# Altium footprint library WR-PHD_Socket Header.PcbLib: 279 footprints (part 11 of 18)
Each footprint in its own frame and in the unit in brackets; x right, y up, seen from the top. Pads: shape width x height; smd on the part's side, far side on the other; paste and mask are expansions set on the pad; w line width, h text height; cw(c..) or ccw(c..) is an arc to the next point about the centre after c.
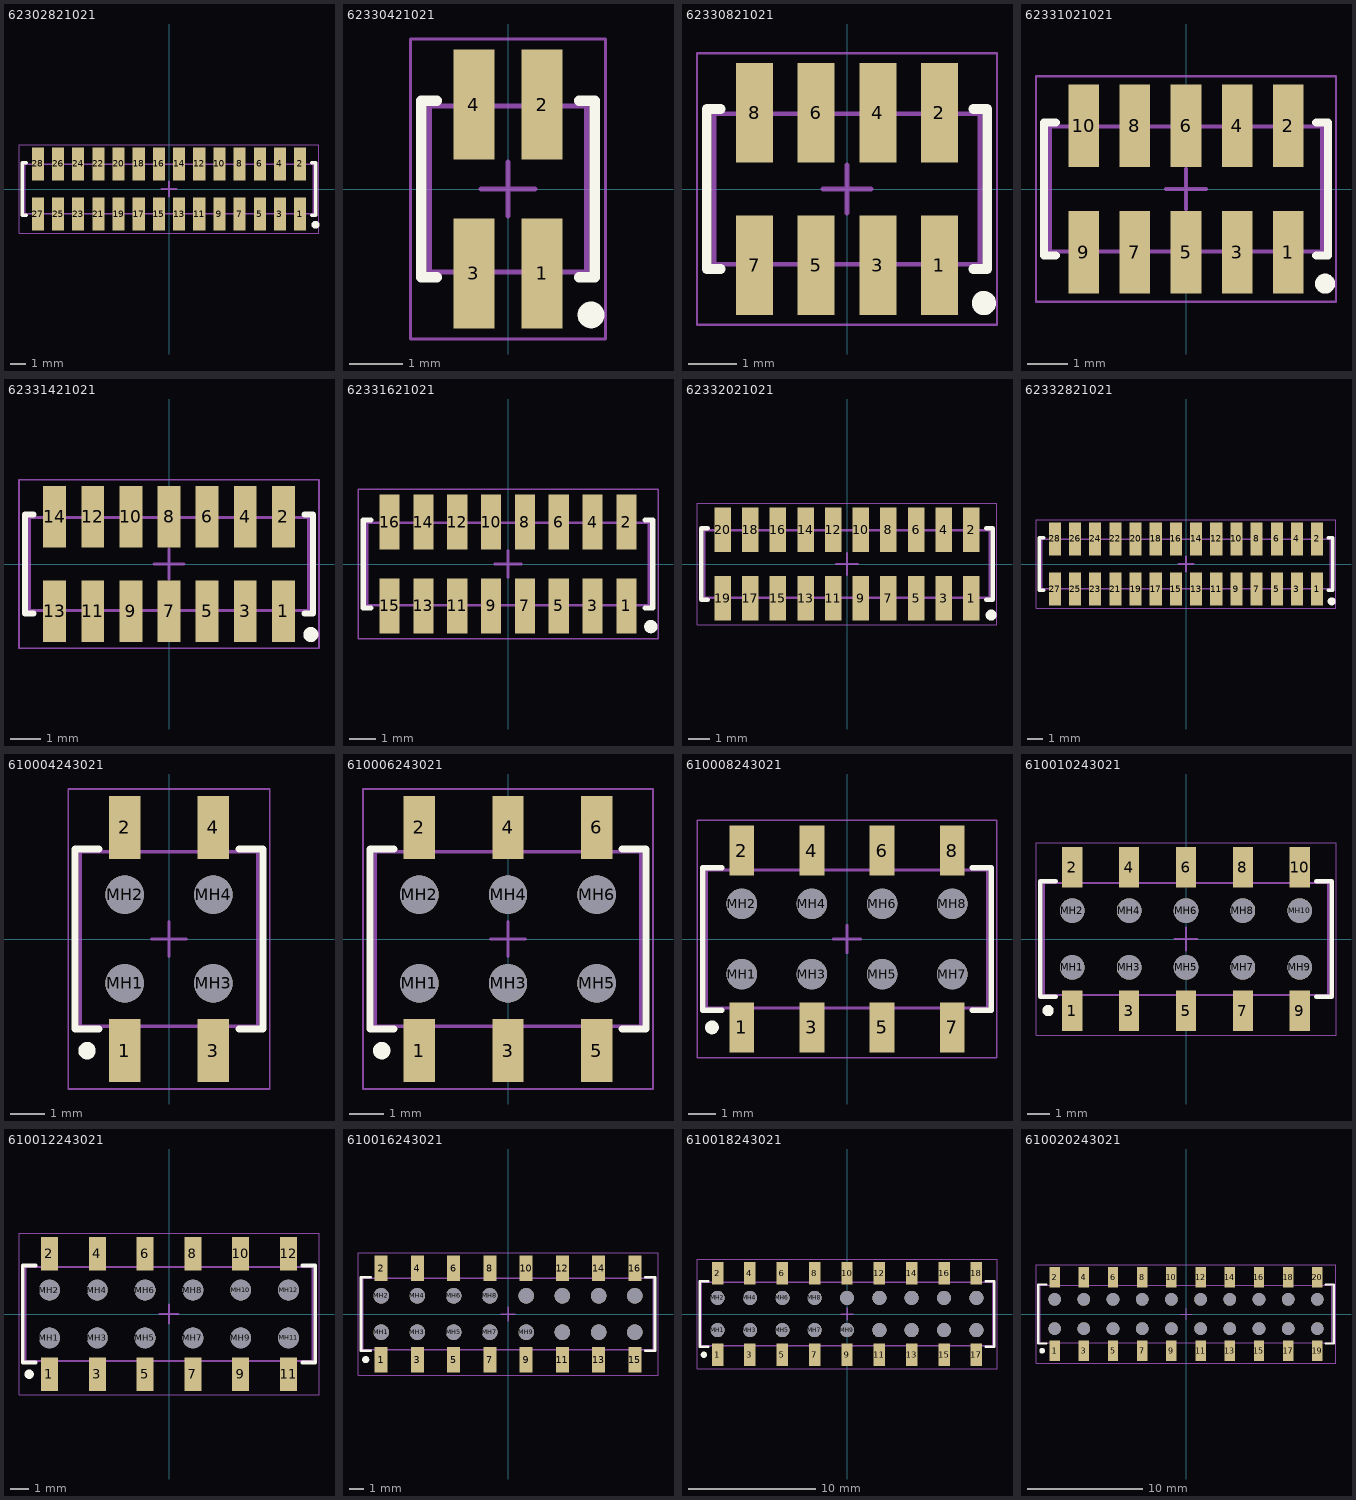
[diagram p10: the footprints below, top view; thin cyan lines are the x and y axes]

## 62302821021 [mm] "Socket Header, Pitch 1.27 mm, SMT, Vertical, dual row, 28p"
height 4.7
pads (28):
  rect 0.76x2.05 smd: 1(8.255,-1.575) 2(8.255,1.575) 3(6.985,-1.575) 4(6.985,1.575) 5(5.715,-1.575) 6(5.715,1.575) 7(4.445,-1.575) 8(4.445,1.575) 9(3.175,-1.575) 10(3.175,1.575) 11(1.905,-1.575) 12(1.905,1.575) 13(0.635,-1.575) 14(0.635,1.575) 15(-0.635,-1.575) 16(-0.635,1.575) 17(-1.905,-1.575) 18(-1.905,1.575) 19(-3.175,-1.575) 20(-3.175,1.575) 21(-4.445,-1.575) 22(-4.445,1.575) 23(-5.715,-1.575) 24(-5.715,1.575) 25(-6.985,-1.575) 26(-6.985,1.575) 27(-8.255,-1.575) 28(-8.255,1.575)
Top Overlay:
  circle w0.25: c9.22,-2.25 r0.125
  lines w0.2: -8.97,-1.65 -9.24,-1.65 -9.24,1.65 -8.97,1.65 ; 8.97,-1.65 9.24,-1.65 9.24,1.65 8.97,1.65
Top Component Outline:
  lines w0.1: -8.505,-1.55 -8.505,-2.3 -8.005,-2.3 -8.005,-1.55 ; -8.505,1.55 -8.505,2.3 -8.005,2.3 -8.005,1.55 ; -7.235,-1.55 -7.235,-2.3 -6.735,-2.3 -6.735,-1.55 ; -7.235,1.55 -7.235,2.3 -6.735,2.3 -6.735,1.55 ; -5.965,-1.55 -5.965,-2.3 -5.465,-2.3 -5.465,-1.55 ; -5.965,1.55 -5.965,2.3 -5.465,2.3 -5.465,1.55 ; -4.695,-1.55 -4.695,-2.3 -4.195,-2.3 -4.195,-1.55 ; -4.695,1.55 -4.695,2.3 -4.195,2.3 -4.195,1.55 ; -3.425,-1.55 -3.425,-2.3 -2.925,-2.3 -2.925,-1.55 ; -3.425,1.55 -3.425,2.3 -2.925,2.3 -2.925,1.55 ; -2.155,-1.55 -2.155,-2.3 -1.655,-2.3 -1.655,-1.55 ; -2.155,1.55 -2.155,2.3 -1.655,2.3 -1.655,1.55 ; -0.885,-1.55 -0.885,-2.3 -0.385,-2.3 -0.385,-1.55 ; -0.885,1.55 -0.885,2.3 -0.385,2.3 -0.385,1.55 ; 0.385,-1.55 0.385,-2.3 0.885,-2.3 0.885,-1.55 ; 0.385,1.55 0.385,2.3 0.885,2.3 0.885,1.55 ; 1.655,-1.55 1.655,-2.3 2.155,-2.3 2.155,-1.55 ; 1.655,1.55 1.655,2.3 2.155,2.3 2.155,1.55 ; 2.925,-1.55 2.925,-2.3 3.425,-2.3 3.425,-1.55 ; 2.925,1.55 2.925,2.3 3.425,2.3 3.425,1.55 ; 4.195,-1.55 4.195,-2.3 4.695,-2.3 4.695,-1.55 ; 4.195,1.55 4.195,2.3 4.695,2.3 4.695,1.55 ; 5.465,-1.55 5.465,-2.3 5.965,-2.3 5.965,-1.55 ; 5.465,1.55 5.465,2.3 5.965,2.3 5.965,1.55 ; 6.735,-1.55 6.735,-2.3 7.235,-2.3 7.235,-1.55 ; 6.735,1.55 6.735,2.3 7.235,2.3 7.235,1.55 ; 8.005,-1.55 8.005,-2.3 8.505,-2.3 8.505,-1.55 ; 8.005,1.55 8.005,2.3 8.505,2.3 8.505,1.55 ; -9.09,-1.55 -9.09,1.55 9.09,1.55 9.09,-1.55 -9.09,-1.55
Top Designator:
  text ".Designator" at -3.647,-0.357 h1
Top Courtyard:
  lines w0.05: -9.44,-2.8 9.44,-2.8 9.44,2.8 -9.44,2.8 -9.44,-2.8
Top Component Center:
  lines w0.1: -0.5,0 0.5,0 ; 0,-0.5 0,0.5
3D body "62302821021.stp": height 4.6, standoff 0, extent -9.09,-2.299 9.09,2.299

## 62330421021 [mm] "Socket Header, Pitch 1.27 mm, SMT, Vertical, dual row, 4p"
height 4.7
pads (4):
  rect 0.76x2.05 smd: 1(0.635,-1.575) 2(0.635,1.575) 3(-0.635,-1.575) 4(-0.635,1.575)
Top Overlay:
  circle w0.25: c1.55,-2.35 r0.125
  lines w0.2: -1.33,-1.65 -1.62,-1.65 -1.62,1.65 -1.33,1.65 ; 1.33,-1.65 1.62,-1.65 1.62,1.65 1.33,1.65
Top Component Outline:
  lines w0.1: -0.885,-1.55 -0.885,-2.3 -0.385,-2.3 -0.385,-1.55 ; -0.885,1.55 -0.885,2.3 -0.385,2.3 -0.385,1.55 ; 0.385,-1.55 0.385,-2.3 0.885,-2.3 0.885,-1.55 ; 0.385,1.55 0.385,2.3 0.885,2.3 0.885,1.55 ; -1.47,-1.55 1.47,-1.55 1.47,1.55 -1.47,1.55 -1.47,-1.55
Top Designator:
  text ".Designator" at -3.647,-0.357 h1
Top Courtyard:
  lines w0.05: -1.82,-2.8 -1.82,2.8 1.82,2.8 1.82,-2.8 -1.82,-2.8
Top Component Center:
  lines w0.1: -0.5,0 0.5,0 ; 0,-0.5 0,0.5
3D body "62330421021.stp": height 4.69, standoff -0.01, extent -1.5,-2.299 1.5,2.299

## 62330821021 [mm] "Socket Header, Pitch 1.27 mm, SMT, Vertical, dual row, 8p"
height 4.7
pads (8):
  rect 0.76x2.05 smd: 1(1.905,-1.575) 2(1.905,1.575) 3(0.635,-1.575) 4(0.635,1.575) 5(-0.635,-1.575) 6(-0.635,1.575) 7(-1.905,-1.575) 8(-1.905,1.575)
Top Overlay:
  circle w0.25: c2.82,-2.35 r0.125
  lines w0.2: -2.6,-1.65 -2.89,-1.65 -2.89,1.65 -2.6,1.65 ; 2.6,-1.65 2.89,-1.65 2.89,1.65 2.6,1.65
Top Component Outline:
  lines w0.1: -2.155,-1.55 -2.155,-2.3 -1.655,-2.3 -1.655,-1.55 ; -2.155,1.55 -2.155,2.3 -1.655,2.3 -1.655,1.55 ; -0.885,-1.55 -0.885,-2.3 -0.385,-2.3 -0.385,-1.55 ; -0.885,1.55 -0.885,2.3 -0.385,2.3 -0.385,1.55 ; 0.385,-1.55 0.385,-2.3 0.885,-2.3 0.885,-1.55 ; 0.385,1.55 0.385,2.3 0.885,2.3 0.885,1.55 ; 1.655,-1.55 1.655,-2.3 2.155,-2.3 2.155,-1.55 ; 1.655,1.55 1.655,2.3 2.155,2.3 2.155,1.55 ; -2.74,-1.55 2.74,-1.55 2.74,1.55 -2.74,1.55 -2.74,-1.55
Top Designator:
  text ".Designator" at -3.647,-0.357 h1
Top Courtyard:
  lines w0.05: -3.09,-2.8 -3.09,2.8 3.09,2.8 3.09,-2.8 -3.09,-2.8
Top Component Center:
  lines w0.1: -0.5,0 0.5,0 ; 0,-0.5 0,0.5
3D body "62330821021.stp": height 4.69, standoff -0.01, extent -2.74,-2.299 2.74,2.299

## 62331021021 [mm] "Socket Header, Pitch 1.27 mm, SMT, Vertical, dual row, 10p"
height 4.7
pads (10):
  rect 0.76x2.05 smd: 1(2.54,-1.575) 2(2.54,1.575) 3(1.27,-1.575) 4(1.27,1.575) 5(0,-1.575) 6(0,1.575) 7(-1.27,-1.575) 8(-1.27,1.575) 9(-2.54,-1.575) 10(-2.54,1.575)
Top Overlay:
  circle w0.25: c3.455,-2.35 r0.125
  lines w0.2: -3.235,-1.65 -3.525,-1.65 -3.525,1.65 -3.235,1.65 ; 3.235,-1.65 3.525,-1.65 3.525,1.65 3.235,1.65
Top Component Outline:
  lines w0.1: -2.79,-1.55 -2.79,-2.3 -2.29,-2.3 -2.29,-1.55 ; -2.79,1.55 -2.79,2.3 -2.29,2.3 -2.29,1.55 ; -1.52,-1.55 -1.52,-2.3 -1.02,-2.3 -1.02,-1.55 ; -1.52,1.55 -1.52,2.3 -1.02,2.3 -1.02,1.55 ; -0.25,-1.55 -0.25,-2.3 0.25,-2.3 0.25,-1.55 ; -0.25,1.55 -0.25,2.3 0.25,2.3 0.25,1.55 ; 1.02,-1.55 1.02,-2.3 1.52,-2.3 1.52,-1.55 ; 1.02,1.55 1.02,2.3 1.52,2.3 1.52,1.55 ; 2.29,-1.55 2.29,-2.3 2.79,-2.3 2.79,-1.55 ; 2.29,1.55 2.29,2.3 2.79,2.3 2.79,1.55 ; -3.375,-1.55 3.375,-1.55 3.375,1.55 -3.375,1.55 -3.375,-1.55
Top Designator:
  text ".Designator" at -3.647,-0.357 h1
Top Courtyard:
  lines w0.05: -3.725,-2.8 -3.725,2.8 3.725,2.8 3.725,-2.8 -3.725,-2.8
Top Component Center:
  lines w0.1: -0.5,0 0.5,0 ; 0,-0.5 0,0.5
3D body "62331021021.stp": height 4.69, standoff -0.01, extent -3.375,-2.299 3.375,2.299

## 62331421021 [mm] "Socket Header, Pitch 1.27 mm, SMT, Vertical, dual row, 14p"
height 4.7
pads (14):
  rect 0.76x2.05 smd: 1(3.81,-1.575) 2(3.81,1.575) 3(2.54,-1.575) 4(2.54,1.575) 5(1.27,-1.575) 6(1.27,1.575) 7(0,-1.575) 8(0,1.575) 9(-1.27,-1.575) 10(-1.27,1.575) 11(-2.54,-1.575) 12(-2.54,1.575) 13(-3.81,-1.575) 14(-3.81,1.575)
Top Overlay:
  circle w0.25: c4.725,-2.35 r0.125
  lines w0.2: -4.505,-1.65 -4.795,-1.65 -4.795,1.65 -4.505,1.65 ; 4.505,-1.65 4.795,-1.65 4.795,1.65 4.505,1.65
Top Component Outline:
  lines w0.1: -4.06,-1.55 -4.06,-2.3 -3.56,-2.3 -3.56,-1.55 ; -4.06,1.55 -4.06,2.3 -3.56,2.3 -3.56,1.55 ; -2.79,-1.55 -2.79,-2.3 -2.29,-2.3 -2.29,-1.55 ; -2.79,1.55 -2.79,2.3 -2.29,2.3 -2.29,1.55 ; -1.52,-1.55 -1.52,-2.3 -1.02,-2.3 -1.02,-1.55 ; -1.52,1.55 -1.52,2.3 -1.02,2.3 -1.02,1.55 ; -0.25,-1.55 -0.25,-2.3 0.25,-2.3 0.25,-1.55 ; -0.25,1.55 -0.25,2.3 0.25,2.3 0.25,1.55 ; 1.02,-1.55 1.02,-2.3 1.52,-2.3 1.52,-1.55 ; 1.02,1.55 1.02,2.3 1.52,2.3 1.52,1.55 ; 2.29,-1.55 2.29,-2.3 2.79,-2.3 2.79,-1.55 ; 2.29,1.55 2.29,2.3 2.79,2.3 2.79,1.55 ; 3.56,-1.55 3.56,-2.3 4.06,-2.3 4.06,-1.55 ; 3.56,1.55 3.56,2.3 4.06,2.3 4.06,1.55 ; -4.645,-1.55 4.645,-1.55 4.645,1.55 -4.645,1.55 -4.645,-1.55
Top Designator:
  text ".Designator" at -3.647,-0.357 h1
Top Courtyard:
  lines w0.05: -4.995,-2.8 -4.995,2.8 4.995,2.8 4.995,-2.8 -4.995,-2.8
Top Component Center:
  lines w0.1: -0.5,0 0.5,0 ; 0,-0.5 0,0.5
3D body "62331421021.stp": height 4.69, standoff -0.01, extent -4.645,-2.299 4.645,2.299

## 62331621021 [mm] "Socket Header, Pitch 1.27 mm, SMT, Vertical, dual row, 16p"
height 4.7
pads (16):
  rect 0.76x2.05 smd: 1(4.445,-1.575) 2(4.445,1.575) 3(3.175,-1.575) 4(3.175,1.575) 5(1.905,-1.575) 6(1.905,1.575) 7(0.635,-1.575) 8(0.635,1.575) 9(-0.635,-1.575) 10(-0.635,1.575) 11(-1.905,-1.575) 12(-1.905,1.575) 13(-3.175,-1.575) 14(-3.175,1.575) 15(-4.445,-1.575) 16(-4.445,1.575)
Top Overlay:
  circle w0.25: c5.36,-2.35 r0.125
  lines w0.2: -5.14,-1.65 -5.43,-1.65 -5.43,1.65 -5.14,1.65 ; 5.14,-1.65 5.43,-1.65 5.43,1.65 5.14,1.65
Top Component Outline:
  lines w0.1: -4.695,-1.55 -4.695,-2.3 -4.195,-2.3 -4.195,-1.55 ; -4.695,1.55 -4.695,2.3 -4.195,2.3 -4.195,1.55 ; -3.425,-1.55 -3.425,-2.3 -2.925,-2.3 -2.925,-1.55 ; -3.425,1.55 -3.425,2.3 -2.925,2.3 -2.925,1.55 ; -2.155,-1.55 -2.155,-2.3 -1.655,-2.3 -1.655,-1.55 ; -2.155,1.55 -2.155,2.3 -1.655,2.3 -1.655,1.55 ; -0.885,-1.55 -0.885,-2.3 -0.385,-2.3 -0.385,-1.55 ; -0.885,1.55 -0.885,2.3 -0.385,2.3 -0.385,1.55 ; 0.385,-1.55 0.385,-2.3 0.885,-2.3 0.885,-1.55 ; 0.385,1.55 0.385,2.3 0.885,2.3 0.885,1.55 ; 1.655,-1.55 1.655,-2.3 2.155,-2.3 2.155,-1.55 ; 1.655,1.55 1.655,2.3 2.155,2.3 2.155,1.55 ; 2.925,-1.55 2.925,-2.3 3.425,-2.3 3.425,-1.55 ; 2.925,1.55 2.925,2.3 3.425,2.3 3.425,1.55 ; 4.195,-1.55 4.195,-2.3 4.695,-2.3 4.695,-1.55 ; 4.195,1.55 4.195,2.3 4.695,2.3 4.695,1.55 ; -5.28,-1.55 5.28,-1.55 5.28,1.55 -5.28,1.55 -5.28,-1.55
Top Designator:
  text ".Designator" at -3.647,-0.357 h1
Top Courtyard:
  lines w0.05: -5.63,-2.8 -5.63,2.8 5.63,2.8 5.63,-2.8 -5.63,-2.8
Top Component Center:
  lines w0.1: -0.5,0 0.5,0 ; 0,-0.5 0,0.5
3D body "62331621021.stp": height 4.69, standoff -0.01, extent -5.28,-2.299 5.28,2.299

## 62332021021 [mm] "Socket Header, Pitch 1.27 mm, SMT, Vertical, dual row, 20p"
height 4.7
pads (20):
  rect 0.76x2.05 smd: 1(5.715,-1.575) 2(5.715,1.575) 3(4.445,-1.575) 4(4.445,1.575) 5(3.175,-1.575) 6(3.175,1.575) 7(1.905,-1.575) 8(1.905,1.575) 9(0.635,-1.575) 10(0.635,1.575) 11(-0.635,-1.575) 12(-0.635,1.575) 13(-1.905,-1.575) 14(-1.905,1.575) 15(-3.175,-1.575) 16(-3.175,1.575) 17(-4.445,-1.575) 18(-4.445,1.575) 19(-5.715,-1.575) 20(-5.715,1.575)
Top Overlay:
  circle w0.25: c6.63,-2.35 r0.125
  lines w0.2: -6.41,-1.65 -6.7,-1.65 -6.7,1.65 -6.41,1.65 ; 6.41,-1.65 6.7,-1.65 6.7,1.65 6.41,1.65
Top Component Outline:
  lines w0.1: -5.965,-1.55 -5.965,-2.3 -5.465,-2.3 -5.465,-1.55 ; -5.965,1.55 -5.965,2.3 -5.465,2.3 -5.465,1.55 ; -4.695,-1.55 -4.695,-2.3 -4.195,-2.3 -4.195,-1.55 ; -4.695,1.55 -4.695,2.3 -4.195,2.3 -4.195,1.55 ; -3.425,-1.55 -3.425,-2.3 -2.925,-2.3 -2.925,-1.55 ; -3.425,1.55 -3.425,2.3 -2.925,2.3 -2.925,1.55 ; -2.155,-1.55 -2.155,-2.3 -1.655,-2.3 -1.655,-1.55 ; -2.155,1.55 -2.155,2.3 -1.655,2.3 -1.655,1.55 ; -0.885,-1.55 -0.885,-2.3 -0.385,-2.3 -0.385,-1.55 ; -0.885,1.55 -0.885,2.3 -0.385,2.3 -0.385,1.55 ; 0.385,-1.55 0.385,-2.3 0.885,-2.3 0.885,-1.55 ; 0.385,1.55 0.385,2.3 0.885,2.3 0.885,1.55 ; 1.655,-1.55 1.655,-2.3 2.155,-2.3 2.155,-1.55 ; 1.655,1.55 1.655,2.3 2.155,2.3 2.155,1.55 ; 2.925,-1.55 2.925,-2.3 3.425,-2.3 3.425,-1.55 ; 2.925,1.55 2.925,2.3 3.425,2.3 3.425,1.55 ; 4.195,-1.55 4.195,-2.3 4.695,-2.3 4.695,-1.55 ; 4.195,1.55 4.195,2.3 4.695,2.3 4.695,1.55 ; 5.465,-1.55 5.465,-2.3 5.965,-2.3 5.965,-1.55 ; 5.465,1.55 5.465,2.3 5.965,2.3 5.965,1.55 ; -6.55,-1.55 6.55,-1.55 6.55,1.55 -6.55,1.55 -6.55,-1.55
Top Designator:
  text ".Designator" at -3.647,-0.357 h1
Top Courtyard:
  lines w0.05: -6.9,-2.8 -6.9,2.8 6.9,2.8 6.9,-2.8 -6.9,-2.8
Top Component Center:
  lines w0.1: -0.5,0 0.5,0 ; 0,-0.5 0,0.5
3D body "62332021021.stp": height 4.69, standoff -0.01, extent -6.55,-2.299 6.55,2.299

## 62332821021 [mm] "Socket Header, Pitch 1.27 mm, SMT, Vertical, dual row, 28p"
height 4.7
pads (28):
  rect 0.76x2.05 smd: 1(8.255,-1.575) 2(8.255,1.575) 3(6.985,-1.575) 4(6.985,1.575) 5(5.715,-1.575) 6(5.715,1.575) 7(4.445,-1.575) 8(4.445,1.575) 9(3.175,-1.575) 10(3.175,1.575) 11(1.905,-1.575) 12(1.905,1.575) 13(0.635,-1.575) 14(0.635,1.575) 15(-0.635,-1.575) 16(-0.635,1.575) 17(-1.905,-1.575) 18(-1.905,1.575) 19(-3.175,-1.575) 20(-3.175,1.575) 21(-4.445,-1.575) 22(-4.445,1.575) 23(-5.715,-1.575) 24(-5.715,1.575) 25(-6.985,-1.575) 26(-6.985,1.575) 27(-8.255,-1.575) 28(-8.255,1.575)
Top Overlay:
  circle w0.25: c9.17,-2.35 r0.125
  lines w0.2: -8.95,-1.65 -9.24,-1.65 -9.24,1.65 -8.95,1.65 ; 8.95,-1.65 9.24,-1.65 9.24,1.65 8.95,1.65
Top Component Outline:
  lines w0.1: -8.505,-1.55 -8.505,-2.3 -8.005,-2.3 -8.005,-1.55 ; -8.505,1.55 -8.505,2.3 -8.005,2.3 -8.005,1.55 ; -7.235,-1.55 -7.235,-2.3 -6.735,-2.3 -6.735,-1.55 ; -7.235,1.55 -7.235,2.3 -6.735,2.3 -6.735,1.55 ; -5.965,-1.55 -5.965,-2.3 -5.465,-2.3 -5.465,-1.55 ; -5.965,1.55 -5.965,2.3 -5.465,2.3 -5.465,1.55 ; -4.695,-1.55 -4.695,-2.3 -4.195,-2.3 -4.195,-1.55 ; -4.695,1.55 -4.695,2.3 -4.195,2.3 -4.195,1.55 ; -3.425,-1.55 -3.425,-2.3 -2.925,-2.3 -2.925,-1.55 ; -3.425,1.55 -3.425,2.3 -2.925,2.3 -2.925,1.55 ; -2.155,-1.55 -2.155,-2.3 -1.655,-2.3 -1.655,-1.55 ; -2.155,1.55 -2.155,2.3 -1.655,2.3 -1.655,1.55 ; -0.885,-1.55 -0.885,-2.3 -0.385,-2.3 -0.385,-1.55 ; -0.885,1.55 -0.885,2.3 -0.385,2.3 -0.385,1.55 ; 0.385,-1.55 0.385,-2.3 0.885,-2.3 0.885,-1.55 ; 0.385,1.55 0.385,2.3 0.885,2.3 0.885,1.55 ; 1.655,-1.55 1.655,-2.3 2.155,-2.3 2.155,-1.55 ; 1.655,1.55 1.655,2.3 2.155,2.3 2.155,1.55 ; 2.925,-1.55 2.925,-2.3 3.425,-2.3 3.425,-1.55 ; 2.925,1.55 2.925,2.3 3.425,2.3 3.425,1.55 ; 4.195,-1.55 4.195,-2.3 4.695,-2.3 4.695,-1.55 ; 4.195,1.55 4.195,2.3 4.695,2.3 4.695,1.55 ; 5.465,-1.55 5.465,-2.3 5.965,-2.3 5.965,-1.55 ; 5.465,1.55 5.465,2.3 5.965,2.3 5.965,1.55 ; 6.735,-1.55 6.735,-2.3 7.235,-2.3 7.235,-1.55 ; 6.735,1.55 6.735,2.3 7.235,2.3 7.235,1.55 ; 8.005,-1.55 8.005,-2.3 8.505,-2.3 8.505,-1.55 ; 8.005,1.55 8.005,2.3 8.505,2.3 8.505,1.55 ; -9.09,-1.55 9.09,-1.55 9.09,1.55 -9.09,1.55 -9.09,-1.55
Top Designator:
  text ".Designator" at -3.647,-0.357 h1
Top Courtyard:
  lines w0.05: -9.44,-2.8 -9.44,2.8 9.44,2.8 9.44,-2.8 -9.44,-2.8
Top Component Center:
  lines w0.1: -0.5,0 0.5,0 ; 0,-0.5 0,0.5
3D body "62332821021.stp": height 4.69, standoff -0.01, extent -9.09,-2.299 9.09,2.299

## 610004243021 [mm] "Socket Header, Pitch 2.54 mm, SMT, Vertical, dual row, 4p"
height 3.7
pads (8):
  rect 0.9x1.8 smd: 1(-1.27,-3.2) 2(-1.27,3.2) 3(1.27,-3.2) 4(1.27,3.2)
  round 1.1 hole 1.1 unplated: MH1(-1.27,-1.27) MH2(-1.27,1.27) MH3(1.27,-1.27) MH4(1.27,1.27)
Top Overlay:
  circle w0.25: c-2.35,-3.2 r0.125
  lines w0.2: -2,-2.575 -2.69,-2.575 -2.69,2.575 -2,2.575 ; 2,-2.575 2.69,-2.575 2.69,2.575 2,2.575
Top Component Outline:
  lines w0.1: -1.52,-2.5 -1.52,-3.6 -1.02,-3.6 -1.02,-2.5 ; -1.52,2.5 -1.52,3.6 -1.02,3.6 -1.02,2.5 ; 1.02,-2.5 1.02,-3.6 1.52,-3.6 1.52,-2.5 ; 1.02,2.5 1.02,3.6 1.52,3.6 1.52,2.5 ; -2.54,-2.5 2.54,-2.5 2.54,2.5 -2.54,2.5 -2.54,-2.5
Top Designator:
  text ".Designator" at -3.647,-0.357 h1
Top Courtyard:
  lines w0.05: -2.89,-4.3 -2.89,4.3 2.89,4.3 2.89,-4.3 -2.89,-4.3
Top Component Center:
  lines w0.1: -0.5,0 0.5,0 ; 0,-0.5 0,0.5
3D body "610004243021.stp": height 3.7, standoff 0, extent -2.54,-3.603 2.54,3.603

## 610006243021 [mm] "Socket Header, Pitch 2.54 mm, SMT, Vertical, dual row, 6p"
height 3.7
pads (12):
  rect 0.9x1.8 smd: 1(-2.54,-3.2) 2(-2.54,3.2) 3(0,-3.2) 4(0,3.2) 5(2.54,-3.2) 6(2.54,3.2)
  round 1.1 hole 1.1 unplated: MH1(-2.54,-1.27) MH2(-2.54,1.27) MH3(0,-1.27) MH4(0,1.27) MH5(2.54,-1.27) MH6(2.54,1.27)
Top Overlay:
  circle w0.25: c-3.62,-3.2 r0.125
  lines w0.2: -3.27,-2.575 -3.96,-2.575 -3.96,2.575 -3.27,2.575 ; 3.27,-2.575 3.96,-2.575 3.96,2.575 3.27,2.575
Top Component Outline:
  lines w0.1: -2.79,-2.5 -2.79,-3.6 -2.29,-3.6 -2.29,-2.5 ; -2.79,2.5 -2.79,3.6 -2.29,3.6 -2.29,2.5 ; -0.25,-2.5 -0.25,-3.6 0.25,-3.6 0.25,-2.5 ; -0.25,2.5 -0.25,3.6 0.25,3.6 0.25,2.5 ; 2.29,-2.5 2.29,-3.6 2.79,-3.6 2.79,-2.5 ; 2.29,2.5 2.29,3.6 2.79,3.6 2.79,2.5 ; -3.81,-2.5 3.81,-2.5 3.81,2.5 -3.81,2.5 -3.81,-2.5
Top Designator:
  text ".Designator" at -3.647,-0.357 h1
Top Courtyard:
  lines w0.05: -4.16,-4.3 -4.16,4.3 4.16,4.3 4.16,-4.3 -4.16,-4.3
Top Component Center:
  lines w0.1: -0.5,0 0.5,0 ; 0,-0.5 0,0.5
3D body "610006243021.stp": height 3.7, standoff 0, extent -3.81,-3.603 3.81,3.603

## 610008243021 [mm] "Socket Header, Pitch 2.54 mm, SMT, Vertical, dual row, 8p"
height 3.7
pads (16):
  rect 0.9x1.8 smd: 1(-3.81,-3.2) 2(-3.81,3.2) 3(-1.27,-3.2) 4(-1.27,3.2) 5(1.27,-3.2) 6(1.27,3.2) 7(3.81,-3.2) 8(3.81,3.2)
  round 1.1 hole 1.1 unplated: MH1(-3.81,-1.27) MH2(-3.81,1.27) MH3(-1.27,-1.27) MH4(-1.27,1.27) MH5(1.27,-1.27) MH6(1.27,1.27) MH7(3.81,-1.27) MH8(3.81,1.27)
Top Overlay:
  circle w0.25: c-4.89,-3.2 r0.125
  lines w0.2: -4.54,-2.575 -5.23,-2.575 -5.23,2.575 -4.54,2.575 ; 4.54,-2.575 5.23,-2.575 5.23,2.575 4.54,2.575
Top Component Outline:
  lines w0.1: -4.06,-2.5 -4.06,-3.6 -3.56,-3.6 -3.56,-2.5 ; -4.06,2.5 -4.06,3.6 -3.56,3.6 -3.56,2.5 ; -1.52,-2.5 -1.52,-3.6 -1.02,-3.6 -1.02,-2.5 ; -1.52,2.5 -1.52,3.6 -1.02,3.6 -1.02,2.5 ; 1.02,-2.5 1.02,-3.6 1.52,-3.6 1.52,-2.5 ; 1.02,2.5 1.02,3.6 1.52,3.6 1.52,2.5 ; 3.56,-2.5 3.56,-3.6 4.06,-3.6 4.06,-2.5 ; 3.56,2.5 3.56,3.6 4.06,3.6 4.06,2.5 ; -5.08,-2.5 -5.08,2.5 5.08,2.5 5.08,-2.5 -5.08,-2.5
Top Designator:
  text ".Designator" at -3.647,-0.357 h1
Top Courtyard:
  lines w0.05: -5.43,-4.3 5.43,-4.3 5.43,4.3 -5.43,4.3 -5.43,-4.3
Top Component Center:
  lines w0.1: -0.5,0 0.5,0 ; 0,-0.5 0,0.5
3D body "610008243021.stp": height 3.7, standoff 0, extent -5.08,-3.603 5.08,3.603

## 610010243021 [mm] "Socket Header, Pitch 2.54 mm, SMT, Vertical, dual row, 10p"
height 3.7
pads (20):
  rect 0.9x1.8 smd: 1(-5.08,-3.2) 2(-5.08,3.2) 3(-2.54,-3.2) 4(-2.54,3.2) 5(0,-3.2) 6(0,3.2) 7(2.54,-3.2) 8(2.54,3.2) 9(5.08,-3.2) 10(5.08,3.2)
  round 1.1 hole 1.1 unplated: MH1(-5.08,-1.27) MH2(-5.08,1.27) MH3(-2.54,-1.27) MH4(-2.54,1.27) MH5(0,-1.27) MH6(0,1.27) MH7(2.54,-1.27) MH8(2.54,1.27) MH9(5.08,-1.27) MH10(5.08,1.27)
Top Overlay:
  circle w0.25: c-6.16,-3.2 r0.125
  lines w0.2: -5.81,-2.575 -6.5,-2.575 -6.5,2.575 -5.81,2.575 ; 5.81,-2.575 6.5,-2.575 6.5,2.575 5.81,2.575
Top Component Outline:
  lines w0.1: -5.33,-2.5 -5.33,-3.6 -4.83,-3.6 -4.83,-2.5 ; -5.33,2.5 -5.33,3.6 -4.83,3.6 -4.83,2.5 ; -2.79,-2.5 -2.79,-3.6 -2.29,-3.6 -2.29,-2.5 ; -2.79,2.5 -2.79,3.6 -2.29,3.6 -2.29,2.5 ; -0.25,-2.5 -0.25,-3.6 0.25,-3.6 0.25,-2.5 ; -0.25,2.5 -0.25,3.6 0.25,3.6 0.25,2.5 ; 2.29,-2.5 2.29,-3.6 2.79,-3.6 2.79,-2.5 ; 2.29,2.5 2.29,3.6 2.79,3.6 2.79,2.5 ; 4.83,-2.5 4.83,-3.6 5.33,-3.6 5.33,-2.5 ; 4.83,2.5 4.83,3.6 5.33,3.6 5.33,2.5 ; -6.35,-2.5 6.35,-2.5 6.35,2.5 -6.35,2.5 -6.35,-2.5
Top Designator:
  text ".Designator" at -3.647,-0.357 h1
Top Courtyard:
  lines w0.05: -6.7,-4.3 6.7,-4.3 6.7,4.3 -6.7,4.3 -6.7,-4.3
Top Component Center:
  lines w0.1: -0.5,0 0.5,0 ; 0,-0.5 0,0.5
3D body "610010243021.stp": height 3.7, standoff 0, extent -6.35,-3.603 6.35,3.603

## 610012243021 [mm] "Socket Header, Pitch 2.54 mm, SMT, Vertical, dual row, 12p"
height 3.7
pads (24):
  rect 0.9x1.8 smd: 1(-6.35,-3.2) 2(-6.35,3.2) 3(-3.81,-3.2) 4(-3.81,3.2) 5(-1.27,-3.2) 6(-1.27,3.2) 7(1.27,-3.2) 8(1.27,3.2) 9(3.81,-3.2) 10(3.81,3.2) 11(6.35,-3.2) 12(6.35,3.2)
  round 1.1 hole 1.1 unplated: MH1(-6.35,-1.27) MH2(-6.35,1.27) MH3(-3.81,-1.27) MH4(-3.81,1.27) MH5(-1.27,-1.27) MH6(-1.27,1.27) MH7(1.27,-1.27) MH8(1.27,1.27) MH9(3.81,-1.27) MH10(3.81,1.27) MH11(6.35,-1.27) MH12(6.35,1.27)
Top Overlay:
  circle w0.25: c-7.43,-3.2 r0.125
  lines w0.2: -7.08,-2.575 -7.77,-2.575 -7.77,2.575 -7.08,2.575 ; 7.08,-2.575 7.77,-2.575 7.77,2.575 7.08,2.575
Top Component Outline:
  lines w0.1: -6.6,-2.5 -6.6,-3.6 -6.1,-3.6 -6.1,-2.5 ; -6.6,2.5 -6.6,3.6 -6.1,3.6 -6.1,2.5 ; -4.06,-2.5 -4.06,-3.6 -3.56,-3.6 -3.56,-2.5 ; -4.06,2.5 -4.06,3.6 -3.56,3.6 -3.56,2.5 ; -1.52,-2.5 -1.52,-3.6 -1.02,-3.6 -1.02,-2.5 ; -1.52,2.5 -1.52,3.6 -1.02,3.6 -1.02,2.5 ; 1.02,-2.5 1.02,-3.6 1.52,-3.6 1.52,-2.5 ; 1.02,2.5 1.02,3.6 1.52,3.6 1.52,2.5 ; 3.56,-2.5 3.56,-3.6 4.06,-3.6 4.06,-2.5 ; 3.56,2.5 3.56,3.6 4.06,3.6 4.06,2.5 ; 6.1,-2.5 6.1,-3.6 6.6,-3.6 6.6,-2.5 ; 6.1,2.5 6.1,3.6 6.6,3.6 6.6,2.5 ; -7.62,-2.5 -7.62,2.5 7.62,2.5 7.62,-2.5 -7.62,-2.5
Top Designator:
  text ".Designator" at -3.647,-0.357 h1
Top Courtyard:
  lines w0.05: -7.97,-4.3 -7.97,4.3 7.97,4.3 7.97,-4.3 -7.97,-4.3
Top Component Center:
  lines w0.1: -0.5,0 0.5,0 ; 0,-0.5 0,0.5
3D body "610012243021.stp": height 3.7, standoff 0, extent -7.62,-3.603 7.62,3.603

## 610016243021 [mm] "Socket Header, Pitch 2.54 mm, SMT, Vertical, dual row, 16p"
height 3.7
pads (32):
  rect 0.9x1.8 smd: 1(-8.89,-3.2) 2(-8.89,3.2) 3(-6.35,-3.2) 4(-6.35,3.2) 5(-3.81,-3.2) 6(-3.81,3.2) 7(-1.27,-3.2) 8(-1.27,3.2) 9(1.27,-3.2) 10(1.27,3.2) 11(3.81,-3.2) 12(3.81,3.2) 13(6.35,-3.2) 14(6.35,3.2) 15(8.89,-3.2) 16(8.89,3.2)
  round 1.1 hole 1.1 unplated: MH1(-8.89,-1.27) MH2(-8.89,1.27) MH3(-6.35,-1.27) MH4(-6.35,1.27) MH5(-3.81,-1.27) MH6(-3.81,1.27) MH7(-1.27,-1.27) MH8(-1.27,1.27) MH9(1.27,-1.27) MH10(1.27,1.27) MH11(3.81,-1.27) MH12(3.81,1.27) MH13(6.35,-1.27) MH14(6.35,1.27) MH15(8.89,-1.27) MH16(8.89,1.27)
Top Overlay:
  circle w0.25: c-9.97,-3.2 r0.125
  lines w0.2: -9.62,-2.575 -10.31,-2.575 -10.31,2.575 -9.62,2.575 ; 9.62,-2.575 10.31,-2.575 10.31,2.575 9.62,2.575
Top Component Outline:
  lines w0.1: -9.14,-2.5 -9.14,-3.6 -8.64,-3.6 -8.64,-2.5 ; -9.14,2.5 -9.14,3.6 -8.64,3.6 -8.64,2.5 ; -6.6,-2.5 -6.6,-3.6 -6.1,-3.6 -6.1,-2.5 ; -6.6,2.5 -6.6,3.6 -6.1,3.6 -6.1,2.5 ; -4.06,-2.5 -4.06,-3.6 -3.56,-3.6 -3.56,-2.5 ; -4.06,2.5 -4.06,3.6 -3.56,3.6 -3.56,2.5 ; -1.52,-2.5 -1.52,-3.6 -1.02,-3.6 -1.02,-2.5 ; -1.52,2.5 -1.52,3.6 -1.02,3.6 -1.02,2.5 ; 1.02,-2.5 1.02,-3.6 1.52,-3.6 1.52,-2.5 ; 1.02,2.5 1.02,3.6 1.52,3.6 1.52,2.5 ; 3.56,-2.5 3.56,-3.6 4.06,-3.6 4.06,-2.5 ; 3.56,2.5 3.56,3.6 4.06,3.6 4.06,2.5 ; 6.1,-2.5 6.1,-3.6 6.6,-3.6 6.6,-2.5 ; 6.1,2.5 6.1,3.6 6.6,3.6 6.6,2.5 ; 8.64,-2.5 8.64,-3.6 9.14,-3.6 9.14,-2.5 ; 8.64,2.5 8.64,3.6 9.14,3.6 9.14,2.5 ; -10.16,-2.5 -10.16,2.5 10.16,2.5 10.16,-2.5 -10.16,-2.5
Top Designator:
  text ".Designator" at -3.647,-0.357 h1
Top Courtyard:
  lines w0.05: -10.51,-4.3 -10.51,4.3 10.51,4.3 10.51,-4.3 -10.51,-4.3
Top Component Center:
  lines w0.1: -0.5,0 0.5,0 ; 0,-0.5 0,0.5
3D body "610016243021.stp": height 3.7, standoff 0, extent -10.16,-3.603 10.16,3.603

## 610018243021 [mm] "Socket Header, Pitch 2.54 mm, SMT, Vertical, dual row, 18p"
height 3.7
pads (36):
  rect 0.9x1.8 smd: 1(-10.16,-3.2) 2(-10.16,3.2) 3(-7.62,-3.2) 4(-7.62,3.2) 5(-5.08,-3.2) 6(-5.08,3.2) 7(-2.54,-3.2) 8(-2.54,3.2) 9(0,-3.2) 10(0,3.2) 11(2.54,-3.2) 12(2.54,3.2) 13(5.08,-3.2) 14(5.08,3.2) 15(7.62,-3.2) 16(7.62,3.2) 17(10.16,-3.2) 18(10.16,3.2)
  round 1.1 hole 1.1 unplated: MH1(-10.16,-1.27) MH2(-10.16,1.27) MH3(-7.62,-1.27) MH4(-7.62,1.27) MH5(-5.08,-1.27) MH6(-5.08,1.27) MH7(-2.54,-1.27) MH8(-2.54,1.27) MH9(0,-1.27) MH10(0,1.27) MH11(2.54,-1.27) MH12(2.54,1.27) MH13(5.08,-1.27) MH14(5.08,1.27) MH15(7.62,-1.27) MH16(7.62,1.27) MH17(10.16,-1.27) MH18(10.16,1.27)
Top Overlay:
  circle w0.25: c-11.24,-3.2 r0.125
  lines w0.2: -10.89,-2.575 -11.58,-2.575 -11.58,2.575 -10.89,2.575 ; 10.89,-2.575 11.58,-2.575 11.58,2.575 10.89,2.575
Top Component Outline:
  lines w0.1: -10.41,-2.5 -10.41,-3.6 -9.91,-3.6 -9.91,-2.5 ; -10.41,2.5 -10.41,3.6 -9.91,3.6 -9.91,2.5 ; -7.87,-2.5 -7.87,-3.6 -7.37,-3.6 -7.37,-2.5 ; -7.87,2.5 -7.87,3.6 -7.37,3.6 -7.37,2.5 ; -5.33,-2.5 -5.33,-3.6 -4.83,-3.6 -4.83,-2.5 ; -5.33,2.5 -5.33,3.6 -4.83,3.6 -4.83,2.5 ; -2.79,-2.5 -2.79,-3.6 -2.29,-3.6 -2.29,-2.5 ; -2.79,2.5 -2.79,3.6 -2.29,3.6 -2.29,2.5 ; -0.25,-2.5 -0.25,-3.6 0.25,-3.6 0.25,-2.5 ; -0.25,2.5 -0.25,3.6 0.25,3.6 0.25,2.5 ; 2.29,-2.5 2.29,-3.6 2.79,-3.6 2.79,-2.5 ; 2.29,2.5 2.29,3.6 2.79,3.6 2.79,2.5 ; 4.83,-2.5 4.83,-3.6 5.33,-3.6 5.33,-2.5 ; 4.83,2.5 4.83,3.6 5.33,3.6 5.33,2.5 ; 7.37,-2.5 7.37,-3.6 7.87,-3.6 7.87,-2.5 ; 7.37,2.5 7.37,3.6 7.87,3.6 7.87,2.5 ; 9.91,-2.5 9.91,-3.6 10.41,-3.6 10.41,-2.5 ; 9.91,2.5 9.91,3.6 10.41,3.6 10.41,2.5 ; -11.43,-2.5 -11.43,2.5 11.43,2.5 11.43,-2.5 -11.43,-2.5
Top Designator:
  text ".Designator" at -3.647,-0.357 h1
Top Courtyard:
  lines w0.05: -11.78,-4.3 11.78,-4.3 11.78,4.3 -11.78,4.3 -11.78,-4.3
Top Component Center:
  lines w0.1: -0.5,0 0.5,0 ; 0,-0.5 0,0.5
3D body "610018243021.stp": height 3.7, standoff 0, extent -11.43,-3.603 11.43,3.603

## 610020243021 [mm] "Socket Header, Pitch 2.54 mm, SMT, Vertical, dual row, 20p"
height 3.7
pads (40):
  rect 0.9x1.8 smd: 1(-11.43,-3.2) 2(-11.43,3.2) 3(-8.89,-3.2) 4(-8.89,3.2) 5(-6.35,-3.2) 6(-6.35,3.2) 7(-3.81,-3.2) 8(-3.81,3.2) 9(-1.27,-3.2) 10(-1.27,3.2) 11(1.27,-3.2) 12(1.27,3.2) 13(3.81,-3.2) 14(3.81,3.2) 15(6.35,-3.2) 16(6.35,3.2) 17(8.89,-3.2) 18(8.89,3.2) 19(11.43,-3.2) 20(11.43,3.2)
  round 1.1 hole 1.1 unplated: MH1(-11.43,-1.27) MH2(-11.43,1.27) MH3(-8.89,-1.27) MH4(-8.89,1.27) MH5(-6.35,-1.27) MH6(-6.35,1.27) MH7(-3.81,-1.27) MH8(-3.81,1.27) MH9(-1.27,-1.27) MH10(-1.27,1.27) MH11(1.27,-1.27) MH12(1.27,1.27) MH13(3.81,-1.27) MH14(3.81,1.27) MH15(6.35,-1.27) MH16(6.35,1.27) MH17(8.89,-1.27) MH18(8.89,1.27) MH19(11.43,-1.27) MH20(11.43,1.27)
Top Overlay:
  circle w0.25: c-12.51,-3.2 r0.125
  lines w0.2: -12.16,-2.575 -12.85,-2.575 -12.85,2.575 -12.16,2.575 ; 12.16,-2.575 12.85,-2.575 12.85,2.575 12.16,2.575
Top Component Outline:
  lines w0.1: -11.68,-2.5 -11.68,-3.6 -11.18,-3.6 -11.18,-2.5 ; -11.68,2.5 -11.68,3.6 -11.18,3.6 -11.18,2.5 ; -9.14,-2.5 -9.14,-3.6 -8.64,-3.6 -8.64,-2.5 ; -9.14,2.5 -9.14,3.6 -8.64,3.6 -8.64,2.5 ; -6.6,-2.5 -6.6,-3.6 -6.1,-3.6 -6.1,-2.5 ; -6.6,2.5 -6.6,3.6 -6.1,3.6 -6.1,2.5 ; -4.06,-2.5 -4.06,-3.6 -3.56,-3.6 -3.56,-2.5 ; -4.06,2.5 -4.06,3.6 -3.56,3.6 -3.56,2.5 ; -1.52,-2.5 -1.52,-3.6 -1.02,-3.6 -1.02,-2.5 ; -1.52,2.5 -1.52,3.6 -1.02,3.6 -1.02,2.5 ; 1.02,-2.5 1.02,-3.6 1.52,-3.6 1.52,-2.5 ; 1.02,2.5 1.02,3.6 1.52,3.6 1.52,2.5 ; 3.56,-2.5 3.56,-3.6 4.06,-3.6 4.06,-2.5 ; 3.56,2.5 3.56,3.6 4.06,3.6 4.06,2.5 ; 6.1,-2.5 6.1,-3.6 6.6,-3.6 6.6,-2.5 ; 6.1,2.5 6.1,3.6 6.6,3.6 6.6,2.5 ; 8.64,-2.5 8.64,-3.6 9.14,-3.6 9.14,-2.5 ; 8.64,2.5 8.64,3.6 9.14,3.6 9.14,2.5 ; 11.18,-2.5 11.18,-3.6 11.68,-3.6 11.68,-2.5 ; 11.18,2.5 11.18,3.6 11.68,3.6 11.68,2.5 ; -12.7,-2.5 -12.7,2.5 12.7,2.5 12.7,-2.5 -12.7,-2.5
Top Designator:
  text ".Designator" at -3.647,-0.357 h1
Top Courtyard:
  lines w0.05: -13.05,-4.3 13.05,-4.3 13.05,4.3 -13.05,4.3 -13.05,-4.3
Top Component Center:
  lines w0.1: -0.5,0 0.5,0 ; 0,-0.5 0,0.5
3D body "610020243021.stp": height 3.7, standoff 0, extent -12.7,-3.603 12.7,3.603